# Altium footprint library stm32-electronic-dice.PcbLib: 13 footprints
Each footprint in its own frame and in the unit in brackets; x right, y up, seen from the top. Pads: shape width x height; smd on the part's side, far side on the other; paste and mask are expansions set on the pad; w line width, h text height; cw(c..) or ccw(c..) is an arc to the next point about the centre after c.
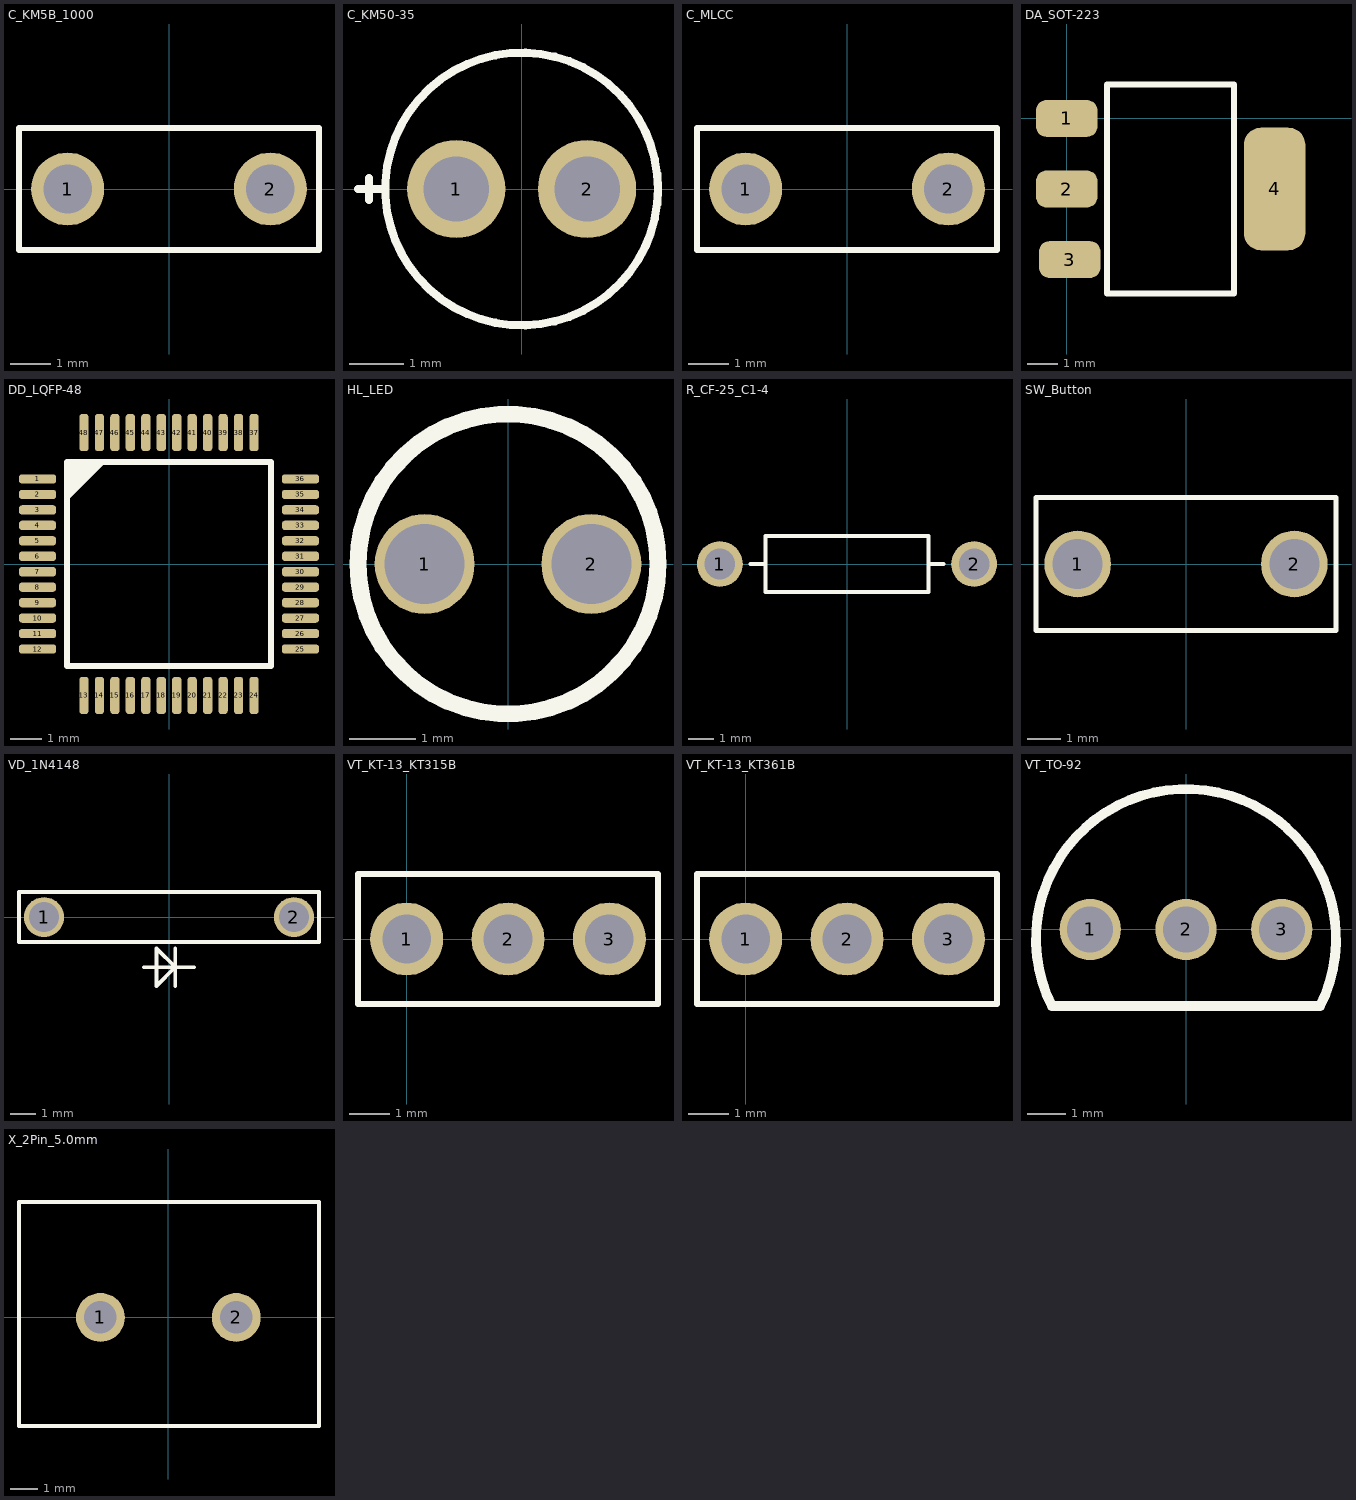
[diagram p0: the footprints below, top view; thin cyan lines are the x and y axes]

## C_KM5B_1000 [mm] "PCB footprint for KM5B capacitor"
pads (2):
  round 1.8 hole 1.2: 1(-2.5,0) 2(2.5,0)
Top Overlay:
  lines w0.15: -3.7,-1.5 -3.7,1.5 3.7,1.5 3.7,-1.5 -3.7,-1.5
3D body "820pf MLCC Ceramic Capacitor.SLDPRT": height 7.5, standoff -7, extent -2.788,-1.251 2.788,1.251

## C_KM50-35 [mm] "PCB footprint for KM50-35 capacitor"
pads (2):
  round 1.8 hole 1.2: 1(-1.2,0) 2(1.2,0)
Top Overlay:
  circle w0.15: c0,0 r2.5
  lines w0.15: -3,0 -2.5,0 ; -2.8,-0.2 -2.8,0.2
3D body "ElCapVT-2.0-5x7.step": height 7, standoff -3, extent -2.501,-2.499 2.5,2.499

## C_MLCC [mm] "Multilayer ceramic capacitor footprint"
pads (2):
  round 1.8 hole 1.2: 1(-2.5,0) 2(2.5,0)
Top Overlay:
  lines w0.15: -3.7,-1.5 -3.7,1.5 3.7,1.5 3.7,-1.5 -3.7,-1.5
3D body "330pF MLCC Ceramic Capacitor.SLDPRT": height 7.5, standoff -7, extent -2.788,-1.251 2.788,1.251

## DA_SOT-223 [mm] "Voltage regulator footprint, SOT-223 package"
pads (4):
  rrect55% 2x1.2 smd: 1(0,0) 2(0,-2.3) 3(0.1,-4.6)
  rrect55% 2x4 smd: 4(6.775,-2.3)
Top Overlay:
  lines w0.2: 1.317,-5.7 1.317,1.1 5.45,1.1 5.45,-5.7 1.317,-5.7
  text "." at -0.6,1.049 h4.5
3D body "AMS1117 Sot 223.step": height 1.8, standoff -0.22, extent -0.45,-5.579 6.923,0.921

## DD_LQFP-48 [mm] "Microcontroller footprint, LQFP-48 package"
pads (48):
  rrect65% 1.2x0.3 smd: 1(-4.25,2.75) 2(-4.25,2.25) 3(-4.25,1.75) 4(-4.25,1.25) 5(-4.25,0.75) 6(-4.25,0.25) 7(-4.25,-0.25) 8(-4.25,-0.75) 9(-4.25,-1.25) 10(-4.25,-1.75) 11(-4.25,-2.25) 12(-4.25,-2.75) 25(4.25,-2.75) 26(4.25,-2.25) 27(4.25,-1.75) 28(4.25,-1.25) 29(4.25,-0.75) 30(4.25,-0.25) 31(4.25,0.25) 32(4.25,0.75) 33(4.25,1.25) 34(4.25,1.75) 35(4.25,2.25) 36(4.25,2.75)
  rrect65% 0.3x1.2 smd: 13(-2.75,-4.25) 14(-2.25,-4.25) 15(-1.75,-4.25) 16(-1.25,-4.25) 17(-0.75,-4.25) 18(-0.25,-4.25) 19(0.25,-4.25) 20(0.75,-4.25) 21(1.25,-4.25) 22(1.75,-4.25) 23(2.25,-4.25) 24(2.75,-4.25) 37(2.75,4.25) 38(2.25,4.25) 39(1.75,4.25) 40(1.25,4.25) 41(0.75,4.25) 42(0.25,4.25) 43(-0.25,4.25) 44(-0.75,4.25) 45(-1.25,4.25) 46(-1.75,4.25) 47(-2.25,4.25) 48(-2.75,4.25)
Top Overlay:
  region: -3.25,3.25 -2.084,3.25 -3.25,2.084
  lines w0.2: -3.3,-3.3 3.3,-3.3 3.3,3.3 -3.3,3.3 -3.3,-3.3
  text "." at -4.572,3.351 h4.5
3D body "LQFP-48.STEP": height 1.59, standoff -0.01, extent -4.5,-4.5 4.5,4.5

## HL_LED [mm] "PCB footprint for LED"
pads (2):
  round 1.5 hole 1.2: 1(-1.25,0) 2(1.25,0)
Top Overlay:
  circle w0.254: c0,0 r2.25
3D body "LED 3mm RED.STEP": height 7.5, standoff -23, extent -1.6,-1.599 1.6,1.599

## R_CF-25_C1-4 [mm] "PCB footprint for CF-25 / C1-4 resistor"
pads (2):
  round 1.8 hole 1.2: 1(-5,0) 2(5,0)
Top Overlay:
  lines w0.15: -3.8,0 -3.2,0 ; 3.2,0 3.8,0 ; -3.2,-1.1 -3.2,1.1 3.2,1.1 3.2,-1.1 0,-1.1 -3.2,-1.1
3D body "2.7R 0.4.STEP": height 2.93, standoff -2.54, extent -5.47,-1.156 5.3,1.156

## SW_Button [mm] "PCB footprint for push-button switch"
pads (2):
  round 2 hole 1.5: 1(-3.25,0) 2(3.25,0)
Top Overlay:
  lines w0.15: -4.5,-2 4.5,-2 4.5,2 -4.5,2 -4.5,0 -4.5,-2
3D body "SW_PUSH-6X3,5_DIP.STEP": height 5.4, standoff -3.04, extent -4.05,-1.75 4.05,1.75

## VD_1N4148 [mm] "PCB footprint for 1N4148 diode"
pads (2):
  round 1.6 hole 1.2: 1(-5,0) 2(5,0)
Top Overlay:
  lines w0.15: -1,-2 1,-2 ; 0.25,-2.75 0.25,-1.25 ; -0.5,-1.25 0.25,-2 -0.5,-2.75 -0.5,-1.25 ; -0.5,-1.25 -0.5,-1.25 ; -6,-1 6,-1 6,1 -6,1 -6,0 -6,-1 ; -0.5,-2 -0.5,-2
3D body "DIODE-1N4148.STEP": height 1.85, standoff -2.5, extent -5.31,-0.853 5.31,0.853

## VT_KT-13_KT315B [mm] "Transistor footprint, KT-13 package, KT315B variant"
pads (3):
  round 1.8 hole 1.2: 1(0,0) 2(2.5,0) 3(5,0)
Top Overlay:
  lines w0.15: -1.2,-1.6 -1.2,1.6 6.2,1.6 6.2,-1.6 -1.2,-1.6
3D body "KT-13_1.STEP": height 9, standoff -2, extent -1.1,-1.5 6.1,1.5

## VT_KT-13_KT361B [mm] "Transistor footprint, KT-13 package, KT361B variant"
pads (3):
  round 1.8 hole 1.2: 1(0,0) 2(2.5,0) 3(5,0)
Top Overlay:
  lines w0.15: -1.2,-1.6 -1.2,1.6 6.2,1.6 6.2,-1.6 -1.2,-1.6
3D body "KT-13_1.STEP": height 9, standoff -2, extent -1.1,-1.5 6.1,1.5

## VT_TO-92 [mm] "Transistor footprint, TO-92 package"
pads (3):
  round 1.6 hole 1.2: 1(-2.5,0) 2(0,0) 3(2.5,0)
Top Overlay:
  lines w0.254: -3.5,-2 cw(c0,-0.25) 3.5,-2 -3.5,-2
3D body "TO-92_line_pin_2_5mm_pitch.stp": height 8.2, standoff -3, extent -2.75,-1.85 2.75,2.501

## X_2Pin_5.0mm [mm] "2-pin connector footprint, 5.0 mm pitch"
pads (2):
  round 1.8 hole 1.2: 1(-2.5,0) 2(2.5,0)
Top Overlay:
  lines w0.15: -5.5,-4 -5.5,4.25 5.55,4.25 5.55,-4 -5.5,-4
3D body "KF301-5-2P_blue.step": height 10.46, standoff -3.7, extent -5.15,-3.7 5.2,3.9